# Altium schematic symbol library SchematicLib.SchLib: 12 symbols
Pins are listed as number, name and electrical type; pins without a type are passive.

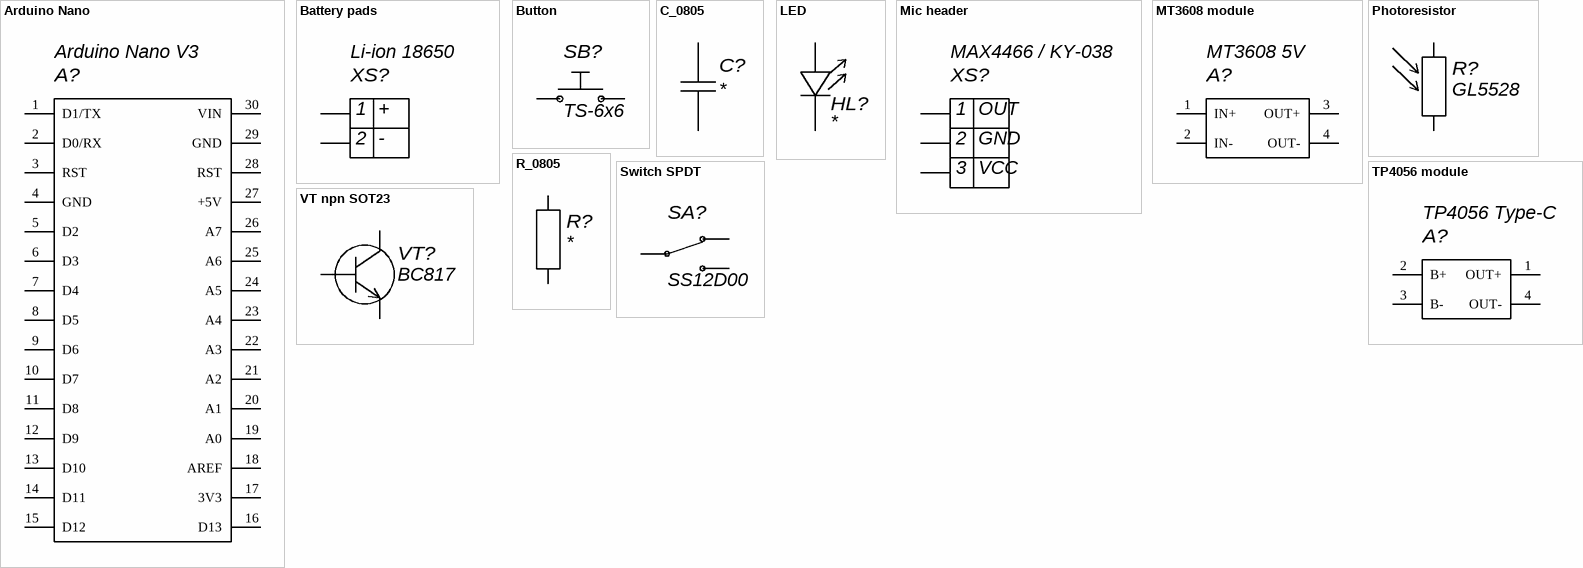
[diagram p0: symbols Arduino Nano to VT npn SOT23]

## Arduino Nano
designator A?, comment Arduino Nano V3
Модуль Arduino Nano V3 (ATmega328P, 16 МГц)
footprint ARDUINO_NANO (Модуль Arduino Nano V3 (ATmega328P, 16 МГц))
pins: 1 D1/TX, 2 D0/RX, 3 RST, 4 GND, 5 D2, 6 D3, 7 D4, 8 D5, 9 D6, 10 D7, 11 D8, 12 D9, 13 D10, 14 D11, 15 D12, 16 D13, 17 3V3, 18 AREF, 19 A0, 20 A1, 21 A2, 22 A3, 23 A4, 24 A5, 25 A6, 26 A7, 27 +5V, 28 RST, 29 GND, 30 VIN

## Battery pads
designator XS?, comment Li-ion 18650
Контактні площадки для акумулятора 18650
footprint BAT_PADS_2 (Контактні площадки для акумулятора 18650)
pins: 1 +, 2 -

## Button
designator SB?, comment TS-6x6
Кнопка тактова 6x6 мм THT
footprint TACT_6X6 (Кнопка тактова 6x6 мм THT)
pins: 1, 2

## C_0805
designator C?
Конденсатор керамічний 0805 SMD
footprint C_0805 (Конденсатор керамічний 0805 SMD)
pins: 1, 2

## LED
designator HL?
Світлодіод 5 мм THT
footprint LED_5MM (Світлодіод 5 мм THT)
pins: 1 K, 2 A

## Mic header
designator XS?, comment MAX4466 / KY-038
Роз'єм PLS-3 для модуля мікрофона
footprint PINHDR_1X3 (Роз'єм PLS-3 для модуля мікрофона)
pins: 1 OUT, 2 GND, 3 VCC

## MT3608 module
designator A?, comment MT3608 5V
Підвищувальний DC-DC модуль MT3608
footprint MOD_MT3608 (Підвищувальний DC-DC модуль MT3608)
pins: 1 IN+, 2 IN-, 3 OUT+, 4 OUT-

## Photoresistor
designator R?, comment GL5528
Фоторезистор GL5528, 5 мм
footprint LDR_5MM (Фоторезистор GL5528, 5 мм)
pins: 1, 2

## R_0805
designator R?
Резистор 0805 SMD, 0.125 Вт, 5%
footprint R_0805 (Резистор 0805 SMD, 0.125 Вт, 5%)
pins: 1, 2

## Switch SPDT
designator SA?, comment SS12D00
Перемикач движковий SS12D00, SPDT
footprint SW_SLIDE_SPDT (Перемикач движковий SS12D00, SPDT)
pins: 1, 2, 3

## TP4056 module
designator A?, comment TP4056 Type-C
Модуль заряду Li-ion TP4056, USB Type-C, захист DW01
footprint MOD_TP4056 (Модуль заряду Li-ion TP4056, USB Type-C, захист DW01)
pins: 1 OUT+, 2 B+, 3 B-, 4 OUT-

## VT npn SOT23
designator VT?, comment BC817
Транзистор NPN BC817-40, SOT-23, 45 В, 0,5 А
footprint SOT-23 (Транзистор NPN BC817-40, SOT-23, 45 В, 0,5 А)
pins: 1 B, 2 E, 3 C